# Altium integrated library Capacitores_SMD.IntLib: 5 symbols
Pins are listed as number, name and electrical type; pins without a type are passive.

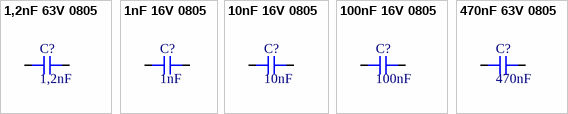
[diagram p0: symbols 1,2nF 63V 0805 to 470nF 63V 0805]

## 1,2nF 63V 0805
designator C?, comment 1,2nF
Capacitor 0805 1,2nF 63V
footprint 0805 Capacitor
pins: 1, 2

## 1nF 16V 0805
designator C?, comment 1nF
Capacitor 0805 1nF 16V
footprint 0805 Capacitor
pins: 1, 2

## 10nF 16V 0805
designator C?, comment 10nF
Capacitor 0805 10nF 16V
footprint 0805 Capacitor
pins: 1, 2

## 100nF 16V 0805
designator C?, comment 100nF
Capacitor 0805 100nF 16V
footprint 0805 Capacitor
pins: 1, 2

## 470nF 63V 0805
designator C?, comment 470nF
Capacitor 0805 470nF 63V
footprint 0805 Capacitor
pins: 1, 2